# Altium footprint library ICs_VendorSpecific.PcbLib: 247 footprints (part 2 of 19)
Each footprint in its own frame and in the unit in brackets; x right, y up, seen from the top. Pads: shape width x height; smd on the part's side, far side on the other; paste and mask are expansions set on the pad; w line width, h text height; cw(c..) or ccw(c..) is an arc to the next point about the centre after c.
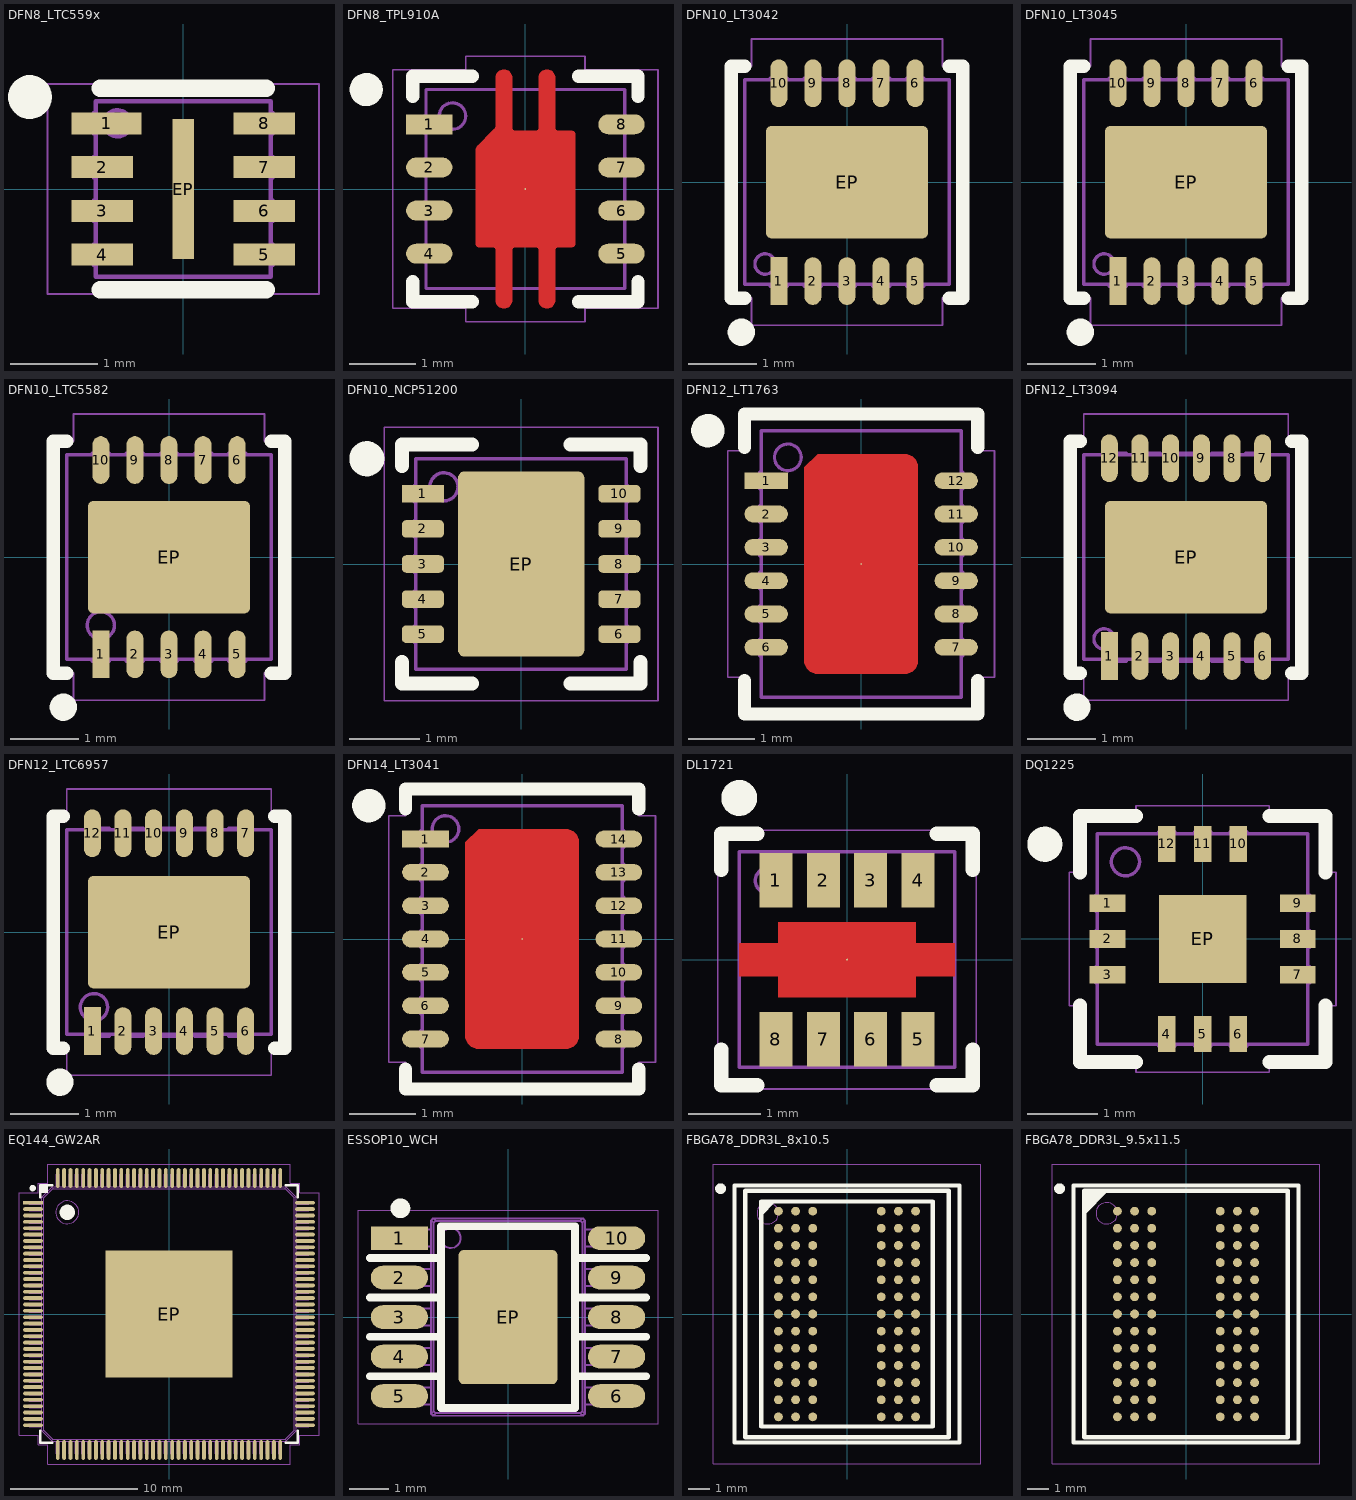
[diagram p1: the footprints below, top view; thin cyan lines are the x and y axes]

## DFN8_LTC559x [mm] "DFN-8 2mm x 2mm, 0.5mm pitch"
height 0.75
pads (9):
  rect 0.8x0.25 smd mask+0.05: 1(-0.875,0.75)
  rect 0.7x0.25 smd mask+0.05: 2(-0.925,0.25) 3(-0.925,-0.25) 4(-0.925,-0.75) 5(0.925,-0.75) 6(0.925,-0.25) 7(0.925,0.25) 8(0.925,0.75)
  rect 0.25x1.6 smd mask+0.05: EP(0,0)
Top Overlay:
  circle w0.25: c-1.75,1.05 r0.125
  lines w0.2: -0.95,-1.15 0.95,-1.15 ; -0.95,1.15 0.95,1.15
Top Courtyard:
  lines w0.025: -1.55,-1.2 1.55,-1.2 1.55,1.2 -1.55,1.2 -1.55,-1.2
Top Assembly:
  circle w0.05: c-0.75,0.75 r0.15
  lines w0.05: -1,-0.865 -1.025,-0.865 -1.025,-0.635 -1,-0.635 ; -1,-0.365 -1.025,-0.365 -1.025,-0.135 -1,-0.135 ; -1,0.135 -1.025,0.135 -1.025,0.365 -1,0.365 ; -1,0.635 -1.025,0.635 -1.025,0.865 -1,0.865 ; 1,-0.865 1.025,-0.865 1.025,-0.635 1,-0.635 ; 1,-0.365 1.025,-0.365 1.025,-0.135 1,-0.135 ; 1,0.135 1.025,0.135 1.025,0.365 1,0.365 ; 1,0.635 1.025,0.635 1.025,0.865 1,0.865 ; -1,-1 1,-1 1,1 -1,1 -1,-1
  text ".Designator" at -2.815,-0.283 h1.25
3D body "DFN8_LT5597.x_t": height 0.8, standoff 0, extent -1.025,-1 1.025,1

## DFN8_TPL910A [mm] "DFN-8 3mm x 3mm, 0.65mm pitch"
height 0.8
pads (9):
  rect 0.7x0.3 smd mask+0.05: 1(-1.45,0.975)
  oval 0.7x0.3 smd mask+0.05: 2(-1.45,0.325) 3(-1.45,-0.325) 4(-1.45,-0.975) 5(1.45,-0.975) 6(1.45,-0.325) 7(1.45,0.325) 8(1.45,0.975)
  round 0.025 smd paste-50 mask+0.05: EP(0,0)
Top Layer:
  region: -0.75,0.575 -0.75,-0.825 -0.75,-0.835 -0.742,-0.853 -0.728,-0.867 -0.71,-0.875 -0.7,-0.875 -0.5,-0.875 -0.49,-0.876 -0.472,-0.883 -0.458,-0.897 -0.451,-0.915 -0.45,-0.925 -0.45,-1.675 -0.45,-1.7 -0.431,-1.746 -0.396,-1.781 -0.35,-1.8 -0.325,-1.8 -0.3,-1.8 -0.254,-1.781 -0.219,-1.746 -0.2,-1.7 -0.2,-1.675 -0.2,-0.925 -0.199,-0.915 -0.192,-0.897 -0.178,-0.883 -0.16,-0.876 -0.15,-0.875 0.15,-0.875 0.16,-0.876 0.178,-0.883 0.192,-0.897 0.199,-0.915 0.2,-0.925 0.2,-1.675 0.2,-1.7 0.219,-1.746 0.254,-1.781 0.3,-1.8 0.325,-1.8 0.35,-1.8 0.396,-1.781 0.431,-1.746 0.45,-1.7 0.45,-1.675 0.45,-0.925 0.451,-0.915 0.458,-0.897 0.472,-0.883 0.49,-0.876 0.5,-0.875 0.7,-0.875 0.71,-0.875 0.728,-0.867 0.742,-0.853 0.75,-0.835 0.75,-0.825 0.75,0.825 0.75,0.835 0.742,0.853 0.728,0.867 0.71,0.875 0.7,0.875 0.5,0.875 0.49,0.876 0.472,0.883 0.458,0.897 0.451,0.915 0.45,0.925 0.45,1.675 0.45,1.7 0.431,1.746 0.396,1.781 0.35,1.8 0.325,1.8 0.3,1.8 0.254,1.781 0.219,1.746 0.2,1.7 0.2,1.675 0.2,0.925 0.199,0.915 0.192,0.897 0.178,0.883 0.16,0.876 0.15,0.875 -0.15,0.875 -0.16,0.876 -0.178,0.883 -0.192,0.897 -0.199,0.915 -0.2,0.925 -0.2,1.675 -0.2,1.7 -0.219,1.746 -0.254,1.781 -0.3,1.8 -0.325,1.8 -0.35,1.8 -0.396,1.781 -0.431,1.746 -0.45,1.7 -0.45,1.675 -0.45,0.95 -0.45,0.944 -0.453,0.932 -0.457,0.922 -0.464,0.912 -0.468,0.907 -0.5,0.875 -0.715,0.66 -0.723,0.652 -0.736,0.632 -0.745,0.61 -0.75,0.587
Top Overlay:
  circle w0.25: c-2.4,1.5 r0.125
  lines w0.2: -1.7,-1.4 -1.7,-1.7 -0.8,-1.7 ; -1.7,1.4 -1.7,1.7 -0.8,1.7 ; 0.8,-1.7 1.7,-1.7 1.7,-1.4 ; 0.8,1.7 1.7,1.7 1.7,1.4
Top Paste:
  region: -0.1,0.7 -0.7,0.7 -0.7,0.1 -0.1,0.1
  region: 0.7,0.7 0.1,0.7 0.1,0.1 0.7,0.1
  region: 0.7,-0.1 0.1,-0.1 0.1,-0.7 0.7,-0.7
  region: -0.1,-0.1 -0.7,-0.1 -0.7,-0.7 -0.1,-0.7
  region: -0.2,-1.1 -0.2,-1.675 -0.2,-1.7 -0.219,-1.746 -0.254,-1.781 -0.3,-1.8 -0.325,-1.8 -0.35,-1.8 -0.396,-1.781 -0.431,-1.746 -0.45,-1.7 -0.45,-1.675 -0.45,-1.1
  region: 0.45,-1.1 0.45,-1.675 0.45,-1.7 0.431,-1.746 0.396,-1.781 0.35,-1.8 0.325,-1.8 0.3,-1.8 0.254,-1.781 0.219,-1.746 0.2,-1.7 0.2,-1.675 0.2,-1.1
  region: 0.2,1.1 0.2,1.675 0.2,1.7 0.219,1.746 0.254,1.781 0.3,1.8 0.325,1.8 0.35,1.8 0.396,1.781 0.431,1.746 0.45,1.7 0.45,1.675 0.45,1.1
  region: -0.45,1.1 -0.45,1.675 -0.45,1.7 -0.431,1.746 -0.396,1.781 -0.35,1.8 -0.325,1.8 -0.3,1.8 -0.254,1.781 -0.219,1.746 -0.2,1.7 -0.2,1.675 -0.2,1.1
Top Courtyard:
  lines w0.025: -2,-1.8 -0.9,-1.8 -0.9,-2 0.9,-2 0.9,-1.8 2,-1.8 2,1.8 0.9,1.8 0.9,2 -0.9,2 -0.9,1.8 -2,1.8 -2,-1.8
Top Assembly:
  circle w0.05: c-1.1,1.1 r0.2
  lines w0.05: -1.525,-1.05 -1.5,-1.05 ; -1.525,-0.9 -1.5,-0.9 ; -1.525,-0.4 -1.5,-0.4 ; -1.525,-0.25 -1.5,-0.25 ; -1.525,0.25 -1.5,0.25 ; -1.525,0.4 -1.5,0.4 ; -1.525,0.9 -1.5,0.9 ; -1.525,1.05 -1.5,1.05 ; -1.5,-1.1 -1.525,-1.1 -1.525,-0.85 -1.5,-0.85 ; -1.5,-0.45 -1.525,-0.45 -1.525,-0.2 -1.5,-0.2 ; -1.5,0.2 -1.525,0.2 -1.525,0.45 -1.5,0.45 ; -1.5,0.85 -1.525,0.85 -1.525,1.1 -1.5,1.1 ; -0.4,-1.5 -0.4,-1.525 -0.25,-1.525 -0.25,-1.5 ; -0.4,1.5 -0.4,1.525 -0.25,1.525 -0.25,1.5 ; 0.25,-1.5 0.25,-1.525 0.4,-1.525 0.4,-1.5 ; 0.25,1.5 0.25,1.525 0.4,1.525 0.4,1.5 ; 1.5,-1.1 1.525,-1.1 1.525,-0.85 1.5,-0.85 ; 1.5,-1.05 1.525,-1.05 ; 1.5,-0.9 1.525,-0.9 ; 1.5,-0.45 1.525,-0.45 1.525,-0.2 1.5,-0.2 ; 1.5,-0.4 1.525,-0.4 ; 1.5,-0.25 1.525,-0.25 ; 1.5,0.2 1.525,0.2 1.525,0.45 1.5,0.45 ; 1.5,0.25 1.525,0.25 ; 1.5,0.4 1.525,0.4 ; 1.5,0.85 1.525,0.85 1.525,1.1 1.5,1.1 ; 1.5,0.9 1.525,0.9 ; 1.5,1.05 1.525,1.05 ; -1.5,-1.5 1.5,-1.5 1.5,1.5 -1.5,1.5 -1.5,-1.5
  text ".Designator" at -2.815,-0.283 h1.25
3D body "DFN8_TPL910A.x_t": height 0.85, standoff 0, extent -1.525,-1.525 1.525,1.525

## DFN10_LT3042 [mm] "Power DFN 3mm x 3mm, 0.5mm pitch. Reference LTC DWG # 05-08-1699 Rev C"
height 0.75
pads (11):
  rect 0.25x0.7 smd paste-0.025 mask+0.05: 1(-1,-1.45)
  oval 0.25x0.7 smd paste-0.025 mask+0.05: 2(-0.5,-1.45) 3(0,-1.45) 4(0.5,-1.45) 5(1,-1.45) 6(1,1.45) 7(0.5,1.45) 8(0,1.45) 9(-0.5,1.45) 10(-1,1.45)
  rrect10% 2.38x1.65 smd paste-3 mask+0.05: EP(0,0)
Top Overlay:
  circle w0.2: c-1.55,-2.2 r0.1
  lines w0.2: -1.5,-1.7 -1.7,-1.7 -1.7,1.7 -1.5,1.7 ; 1.5,-1.7 1.7,-1.7 1.7,1.7 1.5,1.7
Top Paste:
  region: 0.6,0.75 0.6,0.15 1.2,0.15 1.2,0.75
  region: 0.6,-0.15 0.6,-0.75 1.2,-0.75 1.2,-0.15
  region: -1.2,0.75 -1.2,0.15 -0.6,0.15 -0.6,0.75
  region: -1.2,-0.15 -1.2,-0.75 -0.6,-0.75 -0.6,-0.15
  region: -0.3,0.75 -0.3,0.15 0.3,0.15 0.3,0.75
  region: -0.3,-0.15 -0.3,-0.75 0.3,-0.75 0.3,-0.15
Top Courtyard:
  lines w0.025: -1.7,-1.7 -1.4,-1.7 -1.4,-2.1 1.4,-2.1 1.4,-1.7 1.7,-1.7 1.7,1.7 1.4,1.7 1.4,2.1 -1.4,2.1 -1.4,1.7 -1.7,1.7 -1.7,-1.7
Top Assembly:
  circle w0.05: c-1.2,-1.2 r0.15
  lines w0.05: -1.125,-1.5 -1.125,-1.525 -0.875,-1.525 -0.875,-1.5 ; -1.125,1.5 -1.125,1.525 -0.875,1.525 -0.875,1.5 ; -0.625,-1.5 -0.625,-1.525 -0.375,-1.525 -0.375,-1.5 ; -0.625,1.5 -0.625,1.525 -0.375,1.525 -0.375,1.5 ; -0.125,-1.5 -0.125,-1.525 0.125,-1.525 0.125,-1.5 ; -0.125,1.5 -0.125,1.525 0.125,1.525 0.125,1.5 ; 0.375,-1.5 0.375,-1.525 0.625,-1.525 0.625,-1.5 ; 0.375,1.5 0.375,1.525 0.625,1.525 0.625,1.5 ; 0.875,-1.5 0.875,-1.525 1.125,-1.525 1.125,-1.5 ; 0.875,1.5 0.875,1.525 1.125,1.525 1.125,1.5 ; -1.5,-1.5 -1.5,1.5 1.5,1.5 1.5,-1.5 -1.5,-1.5
  text ".Designator" at -4.511,-0.453 h2
3D body "DFN10_LT3042.x_t": height 0.75, standoff 0, extent -1.5,-1.525 1.5,1.525

## DFN10_LT3045 [mm] "Power DFN 3mm x 3mm, 0.5mm pitch. Reference LTC DWG # 05-08-1699 Rev C"
height 0.75
pads (11):
  rect 0.25x0.7 smd paste-0.025 mask+0.05: 1(-1,-1.45)
  oval 0.25x0.7 smd paste-0.025 mask+0.05: 2(-0.5,-1.45) 3(0,-1.45) 4(0.5,-1.45) 5(1,-1.45) 6(1,1.45) 7(0.5,1.45) 8(0,1.45) 9(-0.5,1.45) 10(-1,1.45)
  rrect10% 2.38x1.65 smd paste-3 mask+0.05: EP(0,0)
Top Overlay:
  circle w0.2: c-1.55,-2.2 r0.1
  lines w0.2: -1.5,-1.7 -1.7,-1.7 -1.7,1.7 -1.5,1.7 ; 1.5,-1.7 1.7,-1.7 1.7,1.7 1.5,1.7
Top Paste:
  region: 0.6,0.75 0.6,0.15 1.2,0.15 1.2,0.75
  region: 0.6,-0.15 0.6,-0.75 1.2,-0.75 1.2,-0.15
  region: -1.2,0.75 -1.2,0.15 -0.6,0.15 -0.6,0.75
  region: -1.2,-0.15 -1.2,-0.75 -0.6,-0.75 -0.6,-0.15
  region: -0.3,0.75 -0.3,0.15 0.3,0.15 0.3,0.75
  region: -0.3,-0.15 -0.3,-0.75 0.3,-0.75 0.3,-0.15
Top Courtyard:
  lines w0.025: -1.7,-1.7 -1.4,-1.7 -1.4,-2.1 1.4,-2.1 1.4,-1.7 1.7,-1.7 1.7,1.7 1.4,1.7 1.4,2.1 -1.4,2.1 -1.4,1.7 -1.7,1.7 -1.7,-1.7
Top Assembly:
  circle w0.05: c-1.2,-1.2 r0.15
  lines w0.05: -1.125,-1.5 -1.125,-1.525 -0.875,-1.525 -0.875,-1.5 ; -1.125,1.5 -1.125,1.525 -0.875,1.525 -0.875,1.5 ; -0.625,-1.5 -0.625,-1.525 -0.375,-1.525 -0.375,-1.5 ; -0.625,1.5 -0.625,1.525 -0.375,1.525 -0.375,1.5 ; -0.125,-1.5 -0.125,-1.525 0.125,-1.525 0.125,-1.5 ; -0.125,1.5 -0.125,1.525 0.125,1.525 0.125,1.5 ; 0.375,-1.5 0.375,-1.525 0.625,-1.525 0.625,-1.5 ; 0.375,1.5 0.375,1.525 0.625,1.525 0.625,1.5 ; 0.875,-1.5 0.875,-1.525 1.125,-1.525 1.125,-1.5 ; 0.875,1.5 0.875,1.525 1.125,1.525 1.125,1.5 ; -1.5,-1.5 -1.5,1.5 1.5,1.5 1.5,-1.5 -1.5,-1.5
  text ".Designator" at -4.511,-0.453 h2
3D body "DFN10_LT3045.x_t": height 0.75, standoff 0, extent -1.5,-1.525 1.5,1.525

## DFN10_LTC5582 [mm] "Power DFN 3mm x 3mm, 0.5mm pitch"
height 0.75
pads (11):
  rect 0.25x0.7 smd paste-0.025 mask+0.05: 1(-1,-1.425)
  oval 0.25x0.7 smd paste-0.025 mask+0.05: 2(-0.5,-1.425) 3(0,-1.425) 4(0.5,-1.425) 5(1,-1.425) 6(1,1.425) 7(0.5,1.425) 8(0,1.425) 9(-0.5,1.425) 10(-1,1.425)
  rrect10% 2.38x1.65 smd paste-3 mask+0.05: EP(0,0)
Top Overlay:
  circle w0.2: c-1.55,-2.2 r0.1
  lines w0.2: -1.5,-1.7 -1.7,-1.7 -1.7,1.7 -1.5,1.7 ; 1.5,-1.7 1.7,-1.7 1.7,1.7 1.5,1.7
Top Paste:
  region: 0.5,0.7 0.5,0.1 1.1,0.1 1.1,0.7
  region: 0.5,-0.1 0.5,-0.7 1.1,-0.7 1.1,-0.1
  region: -1.1,0.7 -1.1,0.1 -0.5,0.1 -0.5,0.7
  region: -1.1,-0.1 -1.1,-0.7 -0.5,-0.7 -0.5,-0.1
  region: -0.3,0.7 -0.3,0.1 0.3,0.1 0.3,0.7
  region: -0.3,-0.1 -0.3,-0.7 0.3,-0.7 0.3,-0.1
Top Courtyard:
  lines w0.025: -1.7,-1.7 -1.7,1.7 -1.4,1.7 -1.4,2.1 1.4,2.1 1.4,1.7 1.7,1.7 1.7,-1.7 1.4,-1.7 1.4,-2.1 -1.4,-2.1 -1.4,-1.7 -1.7,-1.7
Top Assembly:
  circle w0.05: c-1,-1 r0.2
  lines w0.05: -1.125,-1.5 -1.125,-1.525 -0.875,-1.525 -0.875,-1.5 ; -1.125,1.5 -1.125,1.525 -0.875,1.525 -0.875,1.5 ; -0.625,-1.5 -0.625,-1.525 -0.375,-1.525 -0.375,-1.5 ; -0.625,1.5 -0.625,1.525 -0.375,1.525 -0.375,1.5 ; -0.125,-1.5 -0.125,-1.525 0.125,-1.525 0.125,-1.5 ; -0.125,1.5 -0.125,1.525 0.125,1.525 0.125,1.5 ; 0.375,-1.5 0.375,-1.525 0.625,-1.525 0.625,-1.5 ; 0.375,1.5 0.375,1.525 0.625,1.525 0.625,1.5 ; 0.875,-1.5 0.875,-1.525 1.125,-1.525 1.125,-1.5 ; 0.875,1.5 0.875,1.525 1.125,1.525 1.125,1.5 ; -1.5,-1.5 1.5,-1.5 1.5,1.5 -1.5,1.5 -1.5,-1.5
  text ".Designator" at -4.511,-0.453 h2
3D body "DFN10_LTC5582.x_t": height 0.8, standoff 0, extent -1.5,-1.525 1.5,1.525

## DFN10_NCP51200 [mm] "DFN10, 3mm x 3mm"
height 1
pads (11):
  rect 0.6x0.25 smd paste+0 mask+0.05: 1(-1.4,1)
  rrect50% 0.6x0.25 smd paste+0 mask+0.05: 2(-1.4,0.5) 3(-1.4,0) 4(-1.4,-0.5) 5(-1.4,-1) 6(1.4,-1) 7(1.4,-0.5) 8(1.4,0) 9(1.4,0.5) 10(1.4,1)
  rrect10% 1.8x2.64 smd paste-2 mask+0.05: EP(0,0)
Top Overlay:
  circle w0.25: c-2.2,1.5 r0.125
  lines w0.2: -1.7,-1.4 -1.7,-1.7 -0.7,-1.7 ; -1.7,1.4 -1.7,1.7 -0.7,1.7 ; 0.7,-1.7 1.7,-1.7 1.7,-1.4 ; 0.7,1.7 1.7,1.7 1.7,1.4
Top Paste:
  rectangle: -0.8,-1.275 -0.15,-0.625
  rectangle: 0.15,-1.275 0.8,-0.625
  rectangle: -0.8,-0.325 -0.15,0.325
  rectangle: 0.15,-0.325 0.8,0.325
  rectangle: -0.8,0.625 -0.15,1.275
  rectangle: 0.15,0.625 0.8,1.275
Top Courtyard:
  lines w0.025: -1.95,-1.95 1.95,-1.95 1.95,1.95 -1.95,1.95 -1.95,-1.95
Top Assembly:
  circle w0.05: c-1.1,1.1 r0.2
  lines w0.05: -1.5,-1.115 -1.52,-1.115 -1.52,-0.885 -1.5,-0.885 ; -1.5,-0.615 -1.52,-0.615 -1.52,-0.385 -1.5,-0.385 ; -1.5,-0.115 -1.52,-0.115 -1.52,0.115 -1.5,0.115 ; -1.5,0.385 -1.52,0.385 -1.52,0.615 -1.5,0.615 ; -1.5,0.885 -1.52,0.885 -1.52,1.115 -1.5,1.115 ; 1.5,-1.115 1.52,-1.115 1.52,-0.885 1.5,-0.885 ; 1.5,-0.615 1.52,-0.615 1.52,-0.385 1.5,-0.385 ; 1.5,-0.115 1.52,-0.115 1.52,0.115 1.5,0.115 ; 1.5,0.385 1.52,0.385 1.52,0.615 1.5,0.615 ; 1.5,0.885 1.52,0.885 1.52,1.115 1.5,1.115 ; -1.5,-1.5 -1.5,1.5 1.5,1.5 1.5,-1.5 -1.5,-1.5
  text ".Designator" at -2.252,-0.226 h1
3D body "DFN10_NCP51200.x_t": height 1.02, standoff 0, extent -1.52,-1.5 1.52,1.5

## DFN12_LT1763 [mm] "Power DFN 3mm x 4mm, 0.5mm pitch"
height 0.75
pads (13):
  rect 0.65x0.25 smd mask+0.05: 1(-1.425,1.25)
  oval 0.65x0.25 smd mask+0.05: 2(-1.425,0.75) 3(-1.425,0.25) 4(-1.425,-0.25) 5(-1.425,-0.75) 6(-1.425,-1.25) 7(1.425,-1.25) 8(1.425,-0.75) 9(1.425,-0.25) 10(1.425,0.25) 11(1.425,0.75) 12(1.425,1.25)
  round 0.025 smd paste-5 mask+0.05: EP(0,0)
Top Layer:
  region: -0.85,-1.49 -0.82,-1.563 -0.763,-1.62 -0.69,-1.65 0.69,-1.65 0.763,-1.62 0.82,-1.563 0.85,-1.49 0.85,-1.45 0.85,-0.85 0.85,0.85 0.85,1.45 0.85,1.49 0.82,1.563 0.763,1.62 0.69,1.65 0.65,1.65 -0.65,1.65 -0.85,1.45 -0.85,-0.85
Top Overlay:
  circle w0.25: c-2.3,2 r0.125
  lines w0.2: -1.75,-1.75 -1.75,-2.25 1.75,-2.25 1.75,-1.75 ; -1.75,1.75 -1.75,2.25 1.75,2.25 1.75,1.75
Top Paste:
  region: -0.1,1.65 -0.6,1.65 -0.6,1.15 -0.1,1.15
  rectangle: 0.1,1.15 0.6,1.65
  region: -0.1,0.25 -0.6,0.25 -0.6,-0.25 -0.1,-0.25
  rectangle: 0.1,-0.25 0.6,0.25
  region: -0.1,0.95 -0.6,0.95 -0.6,0.45 -0.1,0.45
  rectangle: 0.1,0.45 0.6,0.95
  region: -0.1,-1.15 -0.6,-1.15 -0.6,-1.65 -0.1,-1.65
  rectangle: 0.1,-1.65 0.6,-1.15
  region: -0.1,-0.45 -0.6,-0.45 -0.6,-0.95 -0.1,-0.95
  rectangle: 0.1,-0.95 0.6,-0.45
Top Courtyard:
  lines w0.025: -2,-1.7 -1.75,-1.7 -1.75,-2.2 1.75,-2.2 1.75,-1.7 2,-1.7 2,1.7 1.75,1.7 1.75,2.2 -1.75,2.2 -1.75,1.7 -2,1.7 -2,-1.7
Top Assembly:
  circle w0.05: c-1.1,1.6 r0.2
  lines w0.05: -1.5,-1.375 -1.525,-1.375 -1.525,-1.125 -1.5,-1.125 ; -1.5,-0.875 -1.525,-0.875 -1.525,-0.625 -1.5,-0.625 ; -1.5,-0.375 -1.525,-0.375 -1.525,-0.125 -1.5,-0.125 ; -1.5,0.125 -1.525,0.125 -1.525,0.375 -1.5,0.375 ; -1.5,0.625 -1.525,0.625 -1.525,0.875 -1.5,0.875 ; -1.5,1.125 -1.525,1.125 -1.525,1.375 -1.5,1.375 ; 1.5,-1.375 1.525,-1.375 1.525,-1.125 1.5,-1.125 ; 1.5,-0.875 1.525,-0.875 1.525,-0.625 1.5,-0.625 ; 1.5,-0.375 1.525,-0.375 1.525,-0.125 1.5,-0.125 ; 1.5,0.125 1.525,0.125 1.525,0.375 1.5,0.375 ; 1.5,0.625 1.525,0.625 1.525,0.875 1.5,0.875 ; 1.5,1.125 1.525,1.125 1.525,1.375 1.5,1.375 ; -1.5,-2 -1.5,2 1.5,2 1.5,-2 -1.5,-2
  text ".Designator" at 0.453,-4.511 h2
3D body "MO-229-WGED.x_t": height 0.75, standoff 0, extent -1.525,-2 1.525,2

## DFN12_LT3094 [mm] "Power DFN 3mm x 3mm, 0.45mm pitch"
height 0.75
pads (13):
  rect 0.25x0.7 smd paste-0.015 mask+0.05: 1(-1.125,-1.45)
  oval 0.25x0.7 smd paste-0.015 mask+0.05: 2(-0.675,-1.45) 3(-0.225,-1.45) 4(0.225,-1.45) 5(0.675,-1.45) 6(1.125,-1.45) 7(1.125,1.45) 8(0.675,1.45) 9(0.225,1.45) 10(-0.225,1.45) 11(-0.675,1.45) 12(-1.125,1.45)
  rrect10% 2.38x1.65 smd paste-3 mask+0.05: EP(0,0)
Top Overlay:
  circle w0.2: c-1.6,-2.2 r0.1
  lines w0.2: -1.55,-1.7 -1.7,-1.7 -1.7,1.7 -1.55,1.7 ; 1.55,-1.7 1.7,-1.7 1.7,1.7 1.55,1.7
Top Paste:
  region: -0.3,-0.15 -0.3,-0.75 0.3,-0.75 0.3,-0.15
  region: -0.3,0.75 -0.3,0.15 0.3,0.15 0.3,0.75
  region: -1.2,-0.15 -1.2,-0.75 -0.6,-0.75 -0.6,-0.15
  region: -1.2,0.75 -1.2,0.15 -0.6,0.15 -0.6,0.75
  region: 0.6,-0.15 0.6,-0.75 1.2,-0.75 1.2,-0.15
  region: 0.6,0.75 0.6,0.15 1.2,0.15 1.2,0.75
Top Courtyard:
  lines w0.025: -1.7,-1.7 -1.5,-1.7 -1.5,-2.1 1.5,-2.1 1.5,-1.7 1.7,-1.7 1.7,1.7 1.5,1.7 1.5,2.1 -1.5,2.1 -1.5,1.7 -1.7,1.7 -1.7,-1.7
Top Assembly:
  circle w0.05: c-1.2,-1.2 r0.15
  lines w0.05: -1.125,-1.5 -1.125,-1.525 -0.875,-1.525 -0.875,-1.5 ; -1.125,1.5 -1.125,1.525 -0.875,1.525 -0.875,1.5 ; -0.625,-1.5 -0.625,-1.525 -0.375,-1.525 -0.375,-1.5 ; -0.625,1.5 -0.625,1.525 -0.375,1.525 -0.375,1.5 ; -0.125,-1.5 -0.125,-1.525 0.125,-1.525 0.125,-1.5 ; -0.125,1.5 -0.125,1.525 0.125,1.525 0.125,1.5 ; 0.375,-1.5 0.375,-1.525 0.625,-1.525 0.625,-1.5 ; 0.375,1.5 0.375,1.525 0.625,1.525 0.625,1.5 ; 0.875,-1.5 0.875,-1.525 1.125,-1.525 1.125,-1.5 ; 0.875,1.5 0.875,1.525 1.125,1.525 1.125,1.5 ; -1.5,-1.5 -1.5,1.5 1.5,1.5 1.5,-1.5 -1.5,-1.5
  text ".Designator" at -4.511,-0.453 h2
3D body "DFN-12_LT.x_t": height 0.75, standoff 0, extent -1.5,-1.525 1.5,1.525

## DFN12_LTC6957 [mm] "Power DFN 3mm x 3mm, 0.45mm pitch"
height 0.75
pads (13):
  rect 0.25x0.7 smd paste-0.015 mask+0.05: 1(-1.125,-1.45)
  oval 0.25x0.7 smd paste-0.015 mask+0.05: 2(-0.675,-1.45) 3(-0.225,-1.45) 4(0.225,-1.45) 5(0.675,-1.45) 6(1.125,-1.45) 7(1.125,1.45) 8(0.675,1.45) 9(0.225,1.45) 10(-0.225,1.45) 11(-0.675,1.45) 12(-1.125,1.45)
  rrect10% 2.38x1.65 smd paste-3 mask+0.05: EP(0,0)
Top Overlay:
  circle w0.2: c-1.6,-2.2 r0.1
  lines w0.2: -1.55,-1.7 -1.7,-1.7 -1.7,1.7 -1.55,1.7 ; 1.55,-1.7 1.7,-1.7 1.7,1.7 1.55,1.7
Top Paste:
  region: -0.3,-0.15 -0.3,-0.75 0.3,-0.75 0.3,-0.15
  region: -0.3,0.75 -0.3,0.15 0.3,0.15 0.3,0.75
  region: -1.2,-0.15 -1.2,-0.75 -0.6,-0.75 -0.6,-0.15
  region: -1.2,0.75 -1.2,0.15 -0.6,0.15 -0.6,0.75
  region: 0.6,-0.15 0.6,-0.75 1.2,-0.75 1.2,-0.15
  region: 0.6,0.75 0.6,0.15 1.2,0.15 1.2,0.75
Top Courtyard:
  lines w0.025: -1.7,-1.7 -1.5,-1.7 -1.5,-2.1 1.5,-2.1 1.5,-1.7 1.7,-1.7 1.7,1.7 1.5,1.7 1.5,2.1 -1.5,2.1 -1.5,1.7 -1.7,1.7 -1.7,-1.7
Top Assembly:
  circle w0.05: c-1.1,-1.1 r0.2
  lines w0.05: -1.125,-1.5 -1.125,-1.525 -0.875,-1.525 -0.875,-1.5 ; -1.125,1.5 -1.125,1.525 -0.875,1.525 -0.875,1.5 ; -0.625,-1.5 -0.625,-1.525 -0.375,-1.525 -0.375,-1.5 ; -0.625,1.5 -0.625,1.525 -0.375,1.525 -0.375,1.5 ; -0.125,-1.5 -0.125,-1.525 0.125,-1.525 0.125,-1.5 ; -0.125,1.5 -0.125,1.525 0.125,1.525 0.125,1.5 ; 0.375,-1.5 0.375,-1.525 0.625,-1.525 0.625,-1.5 ; 0.375,1.5 0.375,1.525 0.625,1.525 0.625,1.5 ; 0.875,-1.5 0.875,-1.525 1.125,-1.525 1.125,-1.5 ; 0.875,1.5 0.875,1.525 1.125,1.525 1.125,1.5 ; -1.5,-1.5 -1.5,1.5 1.5,1.5 1.5,-1.5 -1.5,-1.5
  text ".Designator" at -4.511,-0.453 h2
3D body "DFN12_LTC6957.x_t": height 0.8, standoff 0, extent -1.5,-1.52 1.5,1.52

## DFN14_LT3041 [mm] "Power DFN 3mm x 4mm, 0.5mm pitch"
height 0.75
pads (15):
  rect 0.7x0.25 smd mask+0.05: 1(-1.45,1.5)
  oval 0.7x0.25 smd mask+0.05: 2(-1.45,1) 3(-1.45,0.5) 4(-1.45,0) 5(-1.45,-0.5) 6(-1.45,-1) 7(-1.45,-1.5) 8(1.45,-1.5) 9(1.45,-1) 10(1.45,-0.5) 11(1.45,0) 12(1.45,0.5) 13(1.45,1) 14(1.45,1.5)
  round 0.025 smd paste-5 mask+0.05: EP(0,0)
Top Layer:
  region: -0.85,-1.49 -0.82,-1.563 -0.763,-1.62 -0.69,-1.65 0.69,-1.65 0.763,-1.62 0.82,-1.563 0.85,-1.49 0.85,-1.45 0.85,-0.85 0.85,0.85 0.85,1.45 0.85,1.49 0.82,1.563 0.763,1.62 0.69,1.65 0.65,1.65 -0.65,1.65 -0.85,1.45 -0.85,-0.85
Top Overlay:
  circle w0.25: c-2.3,2 r0.125
  lines w0.2: -1.75,-1.95 -1.75,-2.25 1.75,-2.25 1.75,-1.95 ; -1.75,1.95 -1.75,2.25 1.75,2.25 1.75,1.95
Top Paste:
  region: -0.1,1.65 -0.6,1.65 -0.6,1.15 -0.1,1.15
  rectangle: 0.1,1.15 0.6,1.65
  region: -0.1,0.25 -0.6,0.25 -0.6,-0.25 -0.1,-0.25
  rectangle: 0.1,-0.25 0.6,0.25
  region: -0.1,0.95 -0.6,0.95 -0.6,0.45 -0.1,0.45
  rectangle: 0.1,0.45 0.6,0.95
  region: -0.1,-1.15 -0.6,-1.15 -0.6,-1.65 -0.1,-1.65
  rectangle: 0.1,-1.65 0.6,-1.15
  region: -0.1,-0.45 -0.6,-0.45 -0.6,-0.95 -0.1,-0.95
  rectangle: 0.1,-0.95 0.6,-0.45
Top Courtyard:
  lines w0.025: -2,-1.85 -1.75,-1.85 -1.75,-2.2 1.75,-2.2 1.75,-1.85 2,-1.85 2,1.85 1.75,1.85 1.75,2.2 -1.75,2.2 -1.75,1.85 -2,1.85 -2,-1.85
Top Assembly:
  circle w0.05: c-1.15,1.65 r0.2
  lines w0.05: -1.5,-1.625 -1.525,-1.625 -1.525,-1.375 -1.5,-1.375 ; -1.5,-1.125 -1.525,-1.125 -1.525,-0.875 -1.5,-0.875 ; -1.5,-0.625 -1.525,-0.625 -1.525,-0.375 -1.5,-0.375 ; -1.5,-0.125 -1.525,-0.125 -1.525,0.125 -1.5,0.125 ; -1.5,0.375 -1.525,0.375 -1.525,0.625 -1.5,0.625 ; -1.5,0.875 -1.525,0.875 -1.525,1.125 -1.5,1.125 ; -1.5,1.375 -1.525,1.375 -1.525,1.625 -1.5,1.625 ; 1.5,-1.625 1.525,-1.625 1.525,-1.375 1.5,-1.375 ; 1.5,-1.125 1.525,-1.125 1.525,-0.875 1.5,-0.875 ; 1.5,-0.625 1.525,-0.625 1.525,-0.375 1.5,-0.375 ; 1.5,-0.125 1.525,-0.125 1.525,0.125 1.5,0.125 ; 1.5,0.375 1.525,0.375 1.525,0.625 1.5,0.625 ; 1.5,0.875 1.525,0.875 1.525,1.125 1.5,1.125 ; 1.5,1.375 1.525,1.375 1.525,1.625 1.5,1.625 ; -1.5,-2 -1.5,2 1.5,2 1.5,-2 -1.5,-2
  text ".Designator" at 0.453,-4.511 h2
3D body "DFN12_LT3041.x_t": height 0.8, standoff 0, extent -1.525,-2 1.525,2

## DL1721 [mm] "DL1721 Minicircuits case style"
height 1.14
pads (9):
  rect 0.46x0.76 smd mask+0.05: 1(-0.99,1.105) 2(-0.33,1.105) 3(0.33,1.105) 4(0.99,1.105) 5(0.99,-1.105) 6(0.33,-1.105) 7(-0.33,-1.105) 8(-0.99,-1.105)
  round 0.025 smd paste-2 mask+0.05: EP(0,0)
Top Layer:
  region: -1.5,-0.23 -0.955,-0.23 -0.955,-0.52 0.955,-0.52 0.955,-0.23 1.5,-0.23 1.5,0.23 0.955,0.23 0.955,0.52 -0.955,0.52 -0.955,0.23 -1.5,0.23
Top Overlay:
  circle w0.25: c-1.5,2.25 r0.125
  lines w0.2: -1.75,-1.25 -1.75,-1.75 -1.25,-1.75 ; -1.75,1.25 -1.75,1.75 -1.25,1.75 ; 1.25,-1.75 1.75,-1.75 1.75,-1.25 ; 1.25,1.75 1.75,1.75 1.75,1.25
Top Paste:
  region: 0.75,0.4 0.1,0.4 0.1,-0.4 0.75,-0.4
  rectangle: -0.75,-0.4 -0.1,0.4
  rectangle: 0.95,-0.23 1.5,0.23
  region: -0.95,0.23 -1.5,0.23 -1.5,-0.23 -0.95,-0.23
Top Courtyard:
  lines w0.025: -1.8,-1.8 1.8,-1.8 1.8,1.8 -1.8,1.8 -1.8,-1.8
Top Assembly:
  circle w0.05: c-1.1,1.1 r0.175
  lines w0.05: -1.5,-1.5 -1.5,1.5 1.5,1.5 1.5,-1.5 -1.5,-1.5
  text ".Designator" at -2.815,-0.283 h1.25
3D body "DL1721.x_t": height 1.14, standoff -0.01, extent -1.5,-1.5 1.5,1.5

## DQ1225 [mm] "Minicircuits DQ1225 case style"
height 0.89
pads (13):
  rect 0.51x0.25 smd mask+0.05: 1(-1.355,0.51) 2(-1.355,0) 3(-1.355,-0.51) 7(1.355,-0.51) 8(1.355,0) 9(1.355,0.51)
  rect 0.25x0.51 smd mask+0.05: 4(-0.51,-1.355) 5(0,-1.355) 6(0.51,-1.355) 10(0.51,1.355) 11(0,1.355) 12(-0.51,1.355)
  rect 1.25x1.25 smd mask+0.05: EP(0,0)
Top Overlay:
  circle w0.25: c-2.25,1.35 r0.125
  lines w0.2: -1.75,-0.95 -1.75,-1.75 -0.95,-1.75 ; -1.75,0.95 -1.75,1.75 -0.95,1.75 ; 0.95,-1.75 1.75,-1.75 1.75,-0.95 ; 0.95,1.75 1.75,1.75 1.75,0.95
Top Courtyard:
  lines w0.025: -1.9,-0.95 -1.8,-0.95 -1.8,-1.8 -0.95,-1.8 -0.95,-1.9 0.95,-1.9 0.95,-1.8 1.8,-1.8 1.8,-0.95 1.9,-0.95 1.9,0.95 1.8,0.95 1.8,1.8 0.95,1.8 0.95,1.9 -0.95,1.9 -0.95,1.8 -1.8,1.8 -1.8,0.95 -1.9,0.95 -1.9,-0.95
Top Assembly:
  circle w0.05: c-1.1,1.1 r0.2
  lines w0.05: -1.5,-0.625 -1.525,-0.625 -1.525,-0.395 -1.5,-0.395 ; -1.5,-0.115 -1.525,-0.115 -1.525,0.115 -1.5,0.115 ; -1.5,0.395 -1.525,0.395 -1.525,0.625 -1.5,0.625 ; -0.625,-1.5 -0.625,-1.525 -0.395,-1.525 -0.395,-1.5 ; -0.625,1.5 -0.625,1.525 -0.395,1.525 -0.395,1.5 ; -0.115,-1.5 -0.115,-1.525 0.115,-1.525 0.115,-1.5 ; -0.115,1.5 -0.115,1.525 0.115,1.525 0.115,1.5 ; 0.395,-1.5 0.395,-1.525 0.625,-1.525 0.625,-1.5 ; 0.395,1.5 0.395,1.525 0.625,1.525 0.625,1.5 ; 1.5,-0.625 1.525,-0.625 1.525,-0.395 1.5,-0.395 ; 1.5,-0.115 1.525,-0.115 1.525,0.115 1.5,0.115 ; 1.5,0.395 1.525,0.395 1.525,0.625 1.5,0.625 ; -1.5,-1.5 -1.5,1.5 1.5,1.5 1.5,-1.5 -1.5,-1.5
  text ".Designator" at -4.511,-0.453 h2
3D body "DQ1225.x_t": height 0.9, standoff 0, extent -1.51,-1.51 1.51,1.51

## EQ144_GW2AR [mm] "EQFP-144, 144-Leads, Body 20.00x20.00mm, Pitch 0.50mm, Thermal Pad 9.74x9.74mm"
height 1.4
pads (145):
  rect 1.55x0.3 smd paste+0 mask+0.05: 1(-10.7,8.75)
  oval 1.55x0.3 smd paste+0 mask+0.05: 2(-10.7,8.25) 3(-10.7,7.75) 4(-10.7,7.25) 5(-10.7,6.75) 6(-10.7,6.25) 7(-10.7,5.75) 8(-10.7,5.25) 9(-10.7,4.75) 10(-10.7,4.25) 11(-10.7,3.75) 12(-10.7,3.25) 13(-10.7,2.75) 14(-10.7,2.25) 15(-10.7,1.75) 16(-10.7,1.25) 17(-10.7,0.75) 18(-10.7,0.25) 19(-10.7,-0.25) 20(-10.7,-0.75) 21(-10.7,-1.25) 22(-10.7,-1.75) 23(-10.7,-2.25) 24(-10.7,-2.75) 25(-10.7,-3.25) 26(-10.7,-3.75) 27(-10.7,-4.25) 28(-10.7,-4.75) 29(-10.7,-5.25) 30(-10.7,-5.75) 31(-10.7,-6.25) 32(-10.7,-6.75) 33(-10.7,-7.25) 34(-10.7,-7.75) 35(-10.7,-8.25) 36(-10.7,-8.75) 73(10.7,-8.75) 74(10.7,-8.25) 75(10.7,-7.75) 76(10.7,-7.25) 77(10.7,-6.75) 78(10.7,-6.25) 79(10.7,-5.75) 80(10.7,-5.25) 81(10.7,-4.75) 82(10.7,-4.25) 83(10.7,-3.75) 84(10.7,-3.25) 85(10.7,-2.75) 86(10.7,-2.25) 87(10.7,-1.75) 88(10.7,-1.25) 89(10.7,-0.75) 90(10.7,-0.25) 91(10.7,0.25) 92(10.7,0.75) 93(10.7,1.25) 94(10.7,1.75) 95(10.7,2.25) 96(10.7,2.75) 97(10.7,3.25) 98(10.7,3.75) 99(10.7,4.25) 100(10.7,4.75) 101(10.7,5.25) 102(10.7,5.75) 103(10.7,6.25) 104(10.7,6.75) 105(10.7,7.25) 106(10.7,7.75) 107(10.7,8.25) 108(10.7,8.75)
  oval 0.3x1.55 smd paste+0 mask+0.05: 37(-8.75,-10.7) 38(-8.25,-10.7) 39(-7.75,-10.7) 40(-7.25,-10.7) 41(-6.75,-10.7) 42(-6.25,-10.7) 43(-5.75,-10.7) 44(-5.25,-10.7) 45(-4.75,-10.7) 46(-4.25,-10.7) 47(-3.75,-10.7) 48(-3.25,-10.7) 49(-2.75,-10.7) 50(-2.25,-10.7) 51(-1.75,-10.7) 52(-1.25,-10.7) 53(-0.75,-10.7) 54(-0.25,-10.7) 55(0.25,-10.7) 56(0.75,-10.7) 57(1.25,-10.7) 58(1.75,-10.7) 59(2.25,-10.7) 60(2.75,-10.7) 61(3.25,-10.7) 62(3.75,-10.7) 63(4.25,-10.7) 64(4.75,-10.7) 65(5.25,-10.7) 66(5.75,-10.7) 67(6.25,-10.7) 68(6.75,-10.7) 69(7.25,-10.7) 70(7.75,-10.7) 71(8.25,-10.7) 72(8.75,-10.7) 109(8.75,10.7) 110(8.25,10.7) 111(7.75,10.7) 112(7.25,10.7) 113(6.75,10.7) 114(6.25,10.7) 115(5.75,10.7) 116(5.25,10.7) 117(4.75,10.7) 118(4.25,10.7) 119(3.75,10.7) 120(3.25,10.7) 121(2.75,10.7) 122(2.25,10.7) 123(1.75,10.7) 124(1.25,10.7) 125(0.75,10.7) 126(0.25,10.7) 127(-0.25,10.7) 128(-0.75,10.7) 129(-1.25,10.7) 130(-1.75,10.7) 131(-2.25,10.7) 132(-2.75,10.7) 133(-3.25,10.7) 134(-3.75,10.7) 135(-4.25,10.7) 136(-4.75,10.7) 137(-5.25,10.7) 138(-5.75,10.7) 139(-6.25,10.7) 140(-6.75,10.7) 141(-7.25,10.7) 142(-7.75,10.7) 143(-8.25,10.7) 144(-8.75,10.7)
  rect 10x10 smd paste-5 mask+0.05: EP(0,0)
Top Overlay:
  circle w0.6: c-8,8 r0.3
  circle w0.25: c-10.725,9.9 r0.125
  rectangle: -10.175,9.5 -9.5,10.175
  lines w0.2: -10.125,-9.2 -10.125,-10.125 -9.2,-10.125 ; -10.125,9.2 -10.125,10.125 -9.2,10.125 ; -10.075,9.6 -10.075,10.075 -9.6,10.075 ; 9.2,-10.125 10.125,-10.125 10.125,-9.2 ; 9.2,10.125 10.125,10.125 10.125,9.2
Top Paste:
  rectangle: -0.75,-0.75 0.75,0.75
  rectangle: -2.55,-0.75 -1.05,0.75
  rectangle: -0.75,-2.55 0.75,-1.05
  rectangle: -2.55,-2.55 -1.05,-1.05
  rectangle: 1.05,1.05 2.55,2.55
  rectangle: 2.85,2.85 4.35,4.35
  rectangle: -4.35,-4.35 -2.85,-2.85
  rectangle: 1.05,-0.75 2.55,0.75
  rectangle: 1.05,-2.55 2.55,-1.05
  rectangle: 2.85,-0.75 4.35,0.75
  rectangle: 2.85,-2.55 4.35,-1.05
  rectangle: -4.35,-0.75 -2.85,0.75
  rectangle: -4.35,-2.55 -2.85,-1.05
  rectangle: -0.75,1.05 0.75,2.55
  rectangle: -2.55,1.05 -1.05,2.55
  rectangle: -4.35,1.05 -2.85,2.55
  rectangle: -0.75,2.85 0.75,4.35
  rectangle: -2.55,2.85 -1.05,4.35
  rectangle: -4.35,2.85 -2.85,4.35
  rectangle: 1.05,2.85 2.55,4.35
  rectangle: 2.85,1.05 4.35,2.55
  rectangle: -0.75,-4.35 0.75,-2.85
  rectangle: -2.55,-4.35 -1.05,-2.85
  rectangle: 1.05,-4.35 2.55,-2.85
  rectangle: 2.85,-4.35 4.35,-2.85
Top Courtyard:
  lines w0.025: -11.8,-9.55 -10.3,-9.55 -10.3,-10.3 -9.55,-10.3 -9.55,-11.8 9.55,-11.8 9.55,-10.3 10.3,-10.3 10.3,-9.55 11.8,-9.55 11.8,9.55 10.3,9.55 10.3,10.3 9.55,10.3 9.55,11.8 -9.55,11.8 -9.55,10.3 -10.3,10.3 -10.3,9.55 -11.8,9.55 -11.8,-9.55
Top Assembly:
  drawing of 1033 lines, arcs and shapes, not listed
  text ".Designator" at -6.763,-0.679 h3
3D body "EQ144_GW2AR.x_t": height 1.5, standoff 0, extent -11,-11 11,11

## ESSOP10_WCH [mm] "Power ESSPO-8 package with exponsed pad"
height 1.8
pads (11):
  rect 1.45x0.6 smd paste+0 mask+0.05: 1(-2.75,2)
  oval 1.45x0.6 smd paste+0 mask+0.05: 2(-2.75,1) 3(-2.75,0) 4(-2.75,-1) 5(-2.75,-2) 6(2.75,-2) 7(2.75,-1) 8(2.75,0) 9(2.75,1) 10(2.75,2)
  rrect10% 2.5x3.4 smd paste-50 mask+0.05: EP(0,0)
Top Overlay:
  circle w0.25: c-2.725,2.755 r0.125
  lines w0.2: -3.5,-1.5 -1.7,-1.5 ; -3.5,-0.5 -1.7,-0.5 ; -3.5,0.5 -1.7,0.5 ; -3.5,1.5 -1.7,1.5 ; 1.7,-1.5 3.5,-1.5 ; 1.7,-0.5 3.5,-0.5 ; 1.7,0.5 3.5,0.5 ; 1.7,1.5 3.5,1.5 ; -1.7,-2.3 1.7,-2.3 1.7,2.3 -1.7,2.3 -1.7,-2.3
Top Paste:
  rectangle: -1.1,0.9 -0.5,1.5
  rectangle: -0.3,0.9 0.3,1.5
  rectangle: 0.5,0.9 1.1,1.5
  rectangle: -1.1,0.1 -0.5,0.7
  rectangle: -0.3,0.1 0.3,0.7
  rectangle: 0.5,0.1 1.1,0.7
  rectangle: -1.1,-0.7 -0.5,-0.1
  rectangle: -0.3,-0.7 0.3,-0.1
  rectangle: 0.5,-0.7 1.1,-0.1
  rectangle: -1.1,-1.5 -0.5,-0.9
  rectangle: -0.3,-1.5 0.3,-0.9
  rectangle: 0.5,-1.5 1.1,-0.9
Top Courtyard:
  lines w0.025: -3.8,-2.7 -3.8,2.7 3.8,2.7 3.8,-2.7 -3.8,-2.7
Top Assembly:
  circle w0.05: c-1.45,2 r0.25
  lines w0.05: -2.737,-2.215 -2.737,-1.785 ; -2.737,-1.215 -2.737,-0.785 ; -2.737,-0.215 -2.737,0.215 ; -2.737,0.785 -2.737,1.215 ; -2.737,1.785 -2.737,2.215 ; -2.67,-2.215 -2.67,-1.785 ; -2.67,-1.215 -2.67,-0.785 ; -2.67,-0.215 -2.67,0.215 ; -2.67,0.785 -2.67,1.215 ; -2.67,1.785 -2.67,2.215 ; -2.493,-2.215 -2.493,-1.785 ; -2.493,-1.215 -2.493,-0.785 ; -2.493,-0.215 -2.493,0.215 ; -2.493,0.785 -2.493,1.215 ; -2.493,1.785 -2.493,2.215 ; -2.348,-2.215 -2.348,-1.785 ; -2.348,-1.215 -2.348,-0.785 ; -2.348,-0.215 -2.348,0.215 ; -2.348,0.785 -2.348,1.215 ; -2.348,1.785 -2.348,2.215 ; -1.95,-2.215 -3,-2.215 -3,-1.785 -1.95,-1.785 ; -1.95,-1.215 -3,-1.215 -3,-0.785 -1.95,-0.785 ; -1.95,-0.215 -3,-0.215 -3,0.215 -1.95,0.215 ; -1.95,0.785 -3,0.785 -3,1.215 -1.95,1.215 ; -1.95,1.785 -3,1.785 -3,2.215 -1.95,2.215 ; 1.95,-2.215 3,-2.215 3,-1.785 1.95,-1.785 ; 1.95,-1.215 3,-1.215 3,-0.785 1.95,-0.785 ; 1.95,-0.215 3,-0.215 3,0.215 1.95,0.215 ; 1.95,0.785 3,0.785 3,1.215 1.95,1.215 ; 1.95,1.785 3,1.785 3,2.215 1.95,2.215 ; 2.348,-2.215 2.348,-1.785 ; 2.348,-1.215 2.348,-0.785 ; 2.348,-0.215 2.348,0.215 ; 2.348,0.785 2.348,1.215 ; 2.348,1.785 2.348,2.215 ; 2.493,-2.215 2.493,-1.785 ; 2.493,-1.215 2.493,-0.785 ; 2.493,-0.215 2.493,0.215 ; 2.493,0.785 2.493,1.215 ; 2.493,1.785 2.493,2.215 ; 2.67,-2.215 2.67,-1.785 ; 2.67,-1.215 2.67,-0.785 ; 2.67,-0.215 2.67,0.215 ; 2.67,0.785 2.67,1.215 ; 2.67,1.785 2.67,2.215 ; 2.737,-2.215 2.737,-1.785 ; 2.737,-1.215 2.737,-0.785 ; 2.737,-0.215 2.737,0.215 ; 2.737,0.785 2.737,1.215 ; 2.737,1.785 2.737,2.215 ; -1.95,-2.45 -1.95,2.45 ; -1.95,-2.449 -1.884,-2.384 ; -1.95,-2.45 -1.9,-2.5 ; -1.95,2.45 -1.884,2.384 ; -1.95,2.45 -1.9,2.5 ; -1.9,-2.5 -1.834,-2.434 ; -1.9,-2.5 1.9,-2.5 ; -1.9,2.5 1.9,2.5 ; -1.899,2.5 -1.834,2.434 ; -1.884,-2.384 -1.884,2.384 ; -1.884,-2.384 -1.834,-2.434 ; -1.884,2.384 -1.834,2.434 ; -1.834,-2.434 1.834,-2.434 ; -1.834,2.434 1.834,2.434 ; 1.834,-2.434 1.884,-2.384 ; 1.834,-2.434 1.9,-2.5 ; 1.834,2.434 1.899,2.5 ; 1.834,2.434 1.884,2.384 ; 1.884,-2.384 1.884,2.384 ; 1.884,-2.384 1.95,-2.449 ; 1.884,2.384 1.95,2.45 ; 1.9,-2.5 1.95,-2.45 ; 1.9,2.5 1.95,2.45 ; 1.95,-2.45 1.95,2.45
  text ".Designator" at 0.453,-4.511 h2
3D body "ESSOP10_WCH.x_t": height 1.8, standoff 0, extent -3,-2.5 3,2.5

## FBGA78_DDR3L_8x10.5 [mm] "BGA, 78-Leads, Body 8,00x10,50mmx1,10mm, Pitch 0,80mm"
height 1.1
pads (78):
  round 0.41 smd mask+0.05: A1(-3.2,4.8) A2(-2.4,4.8) A3(-1.6,4.8) A7(1.6,4.8) A8(2.4,4.8) A9(3.2,4.8) B1(-3.2,4) B2(-2.4,4) B3(-1.6,4) B7(1.6,4) B8(2.4,4) B9(3.2,4) C1(-3.2,3.2) C2(-2.4,3.2) C3(-1.6,3.2) C7(1.6,3.2) C8(2.4,3.2) C9(3.2,3.2) D1(-3.2,2.4) D2(-2.4,2.4) D3(-1.6,2.4) D7(1.6,2.4) D8(2.4,2.4) D9(3.2,2.4) E1(-3.2,1.6) E2(-2.4,1.6) E3(-1.6,1.6) E7(1.6,1.6) E8(2.4,1.6) E9(3.2,1.6) F1(-3.2,0.8) F2(-2.4,0.8) F3(-1.6,0.8) F7(1.6,0.8) F8(2.4,0.8) F9(3.2,0.8) G1(-3.2,0) G2(-2.4,0) G3(-1.6,0) G7(1.6,0) G8(2.4,0) G9(3.2,0) H1(-3.2,-0.8) H2(-2.4,-0.8) H3(-1.6,-0.8) H7(1.6,-0.8) H8(2.4,-0.8) H9(3.2,-0.8) J1(-3.2,-1.6) J2(-2.4,-1.6) J3(-1.6,-1.6) J7(1.6,-1.6) J8(2.4,-1.6) J9(3.2,-1.6) K1(-3.2,-2.4) K2(-2.4,-2.4) K3(-1.6,-2.4) K7(1.6,-2.4) K8(2.4,-2.4) K9(3.2,-2.4) L1(-3.2,-3.2) L2(-2.4,-3.2) L3(-1.6,-3.2) L7(1.6,-3.2) L8(2.4,-3.2) L9(3.2,-3.2) M1(-3.2,-4) M2(-2.4,-4) M3(-1.6,-4) M7(1.6,-4) M8(2.4,-4) M9(3.2,-4) N1(-3.2,-4.8) N2(-2.4,-4.8) N3(-1.6,-4.8) N7(1.6,-4.8) N8(2.4,-4.8) N9(3.2,-4.8)
Top Overlay:
  circle w0.25: c-5.9,5.85 r0.125
  region: -3.45,5.25 -4,4.7 -4,5.25
  lines w0.2: -4,4.7 -3.45,5.25 ; -5.25,-6 -5.25,6 5.25,6 5.25,-6 -5.25,-6 ; -4.75,-5.75 -4.75,5.75 4.75,5.75 4.75,-5.75 -4.75,-5.75 ; -4,-5.25 -4,5.25 4,5.25 4,-5.25 -4,-5.25
Top Courtyard:
  lines w0.025: -6.25,-7 -6.25,7 6.25,7 6.25,-7 -6.25,-7
Top Assembly:
  circle w0.05: c-3.7,4.7 r0.5
  lines w0.05: -4.75,-5.75 -4.75,5.75 4.75,5.75 4.75,-5.75 -4.75,-5.75
  text ".Designator" at -4.511,-0.453 h2
3D body "FBGA78_RKB.x_t": height 1.19, standoff -0.04, extent -4,-5.25 4,5.25

## FBGA78_DDR3L_9.5x11.5 [mm] "BGA, 78-Leads, Body 9,50x11,50mmx1,10mm, Pitch 0,80mm"
height 1.1
pads (78):
  round 0.41 smd mask+0.05: A1(-3.2,4.8) A2(-2.4,4.8) A3(-1.6,4.8) A7(1.6,4.8) A8(2.4,4.8) A9(3.2,4.8) B1(-3.2,4) B2(-2.4,4) B3(-1.6,4) B7(1.6,4) B8(2.4,4) B9(3.2,4) C1(-3.2,3.2) C2(-2.4,3.2) C3(-1.6,3.2) C7(1.6,3.2) C8(2.4,3.2) C9(3.2,3.2) D1(-3.2,2.4) D2(-2.4,2.4) D3(-1.6,2.4) D7(1.6,2.4) D8(2.4,2.4) D9(3.2,2.4) E1(-3.2,1.6) E2(-2.4,1.6) E3(-1.6,1.6) E7(1.6,1.6) E8(2.4,1.6) E9(3.2,1.6) F1(-3.2,0.8) F2(-2.4,0.8) F3(-1.6,0.8) F7(1.6,0.8) F8(2.4,0.8) F9(3.2,0.8) G1(-3.2,0) G2(-2.4,0) G3(-1.6,0) G7(1.6,0) G8(2.4,0) G9(3.2,0) H1(-3.2,-0.8) H2(-2.4,-0.8) H3(-1.6,-0.8) H7(1.6,-0.8) H8(2.4,-0.8) H9(3.2,-0.8) J1(-3.2,-1.6) J2(-2.4,-1.6) J3(-1.6,-1.6) J7(1.6,-1.6) J8(2.4,-1.6) J9(3.2,-1.6) K1(-3.2,-2.4) K2(-2.4,-2.4) K3(-1.6,-2.4) K7(1.6,-2.4) K8(2.4,-2.4) K9(3.2,-2.4) L1(-3.2,-3.2) L2(-2.4,-3.2) L3(-1.6,-3.2) L7(1.6,-3.2) L8(2.4,-3.2) L9(3.2,-3.2) M1(-3.2,-4) M2(-2.4,-4) M3(-1.6,-4) M7(1.6,-4) M8(2.4,-4) M9(3.2,-4) N1(-3.2,-4.8) N2(-2.4,-4.8) N3(-1.6,-4.8) N7(1.6,-4.8) N8(2.4,-4.8) N9(3.2,-4.8)
Top Overlay:
  circle w0.25: c-5.9,5.85 r0.125
  region: -3.75,5.75 -4.75,4.75 -4.75,5.75
  lines w0.2: -4.75,4.75 -3.75,5.75 ; -5.25,-6 5.25,-6 5.25,6 -5.25,6 -5.25,-6 ; -4.75,-5.75 4.75,-5.75 4.75,5.75 -4.75,5.75 -4.75,-5.75
Top Courtyard:
  lines w0.025: -6.25,-7 6.25,-7 6.25,7 -6.25,7 -6.25,-7
Top Assembly:
  circle w0.05: c-3.7,4.7 r0.5
  lines w0.05: -4.75,-5.75 4.75,-5.75 4.75,5.75 -4.75,5.75 -4.75,-5.75
  text ".Designator" at -4.511,-0.453 h2
3D body "FBGA78_TRF.x_t": height 1.19, standoff -0.04, extent -4.75,-5.75 4.75,5.75